# Altium footprint library E28-2G4M27SX_Pcb_lib.PcbLib: 1 footprints
Each footprint in its own frame and in the unit in brackets; x right, y up, seen from the top. Pads: shape width x height; smd on the part's side, far side on the other; paste and mask are expansions set on the pad; w line width, h text height; cw(c..) or ccw(c..) is an arc to the next point about the centre after c.
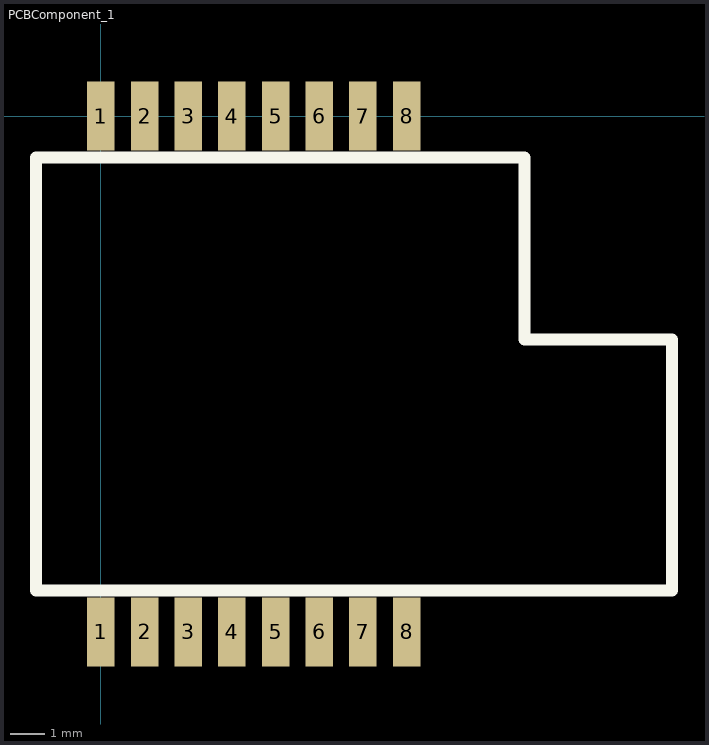
[diagram p0: the footprint, top view; thin cyan lines are the x and y axes]

## PCBComponent_1 [mm]
pads (16):
  rect 0.8x2 smd: 1(0,-15) 1(0,0) 2(1.27,-15) 2(1.27,0) 3(2.54,-15) 3(2.54,0) 4(3.81,-15) 4(3.81,0) 5(5.08,-15) 5(5.08,0) 6(6.35,-15) 6(6.35,0) 7(7.62,-15) 7(7.62,0) 8(8.89,-15) 8(8.89,0)
Top Overlay:
  lines w0.35: -1.89,-13.8 -1.89,-1.2 12.31,-1.2 12.31,-6.5 16.61,-6.5 16.61,-13.8 -1.89,-13.8